# Altium footprint library SOP50P490X110-29N.PcbLib: 1 footprints
Each footprint in its own frame and in the unit in brackets; x right, y up, seen from the top. Pads: shape width x height; smd on the part's side, far side on the other; paste and mask are expansions set on the pad; w line width, h text height; cw(c..) or ccw(c..) is an arc to the next point about the centre after c.
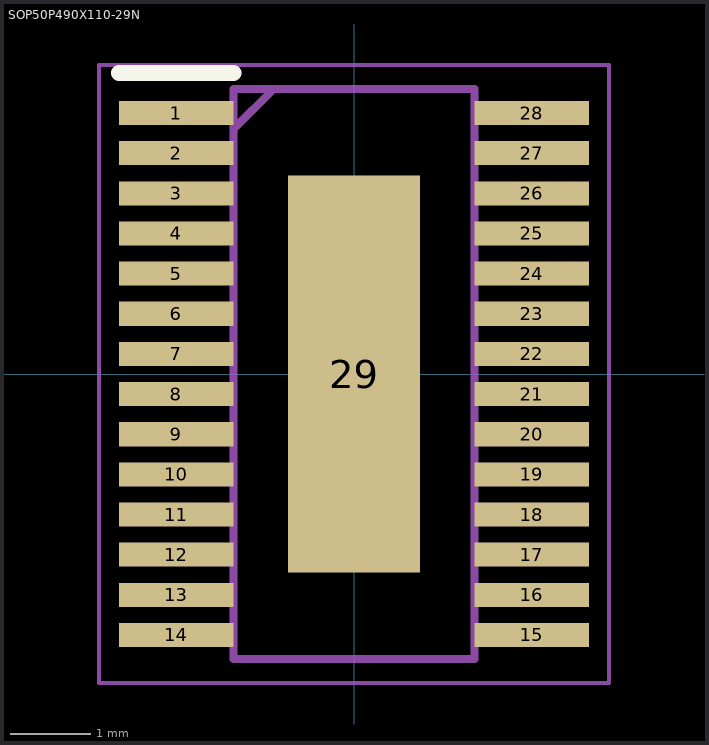
[diagram p0: the footprint, top view; thin cyan lines are the x and y axes]

## SOP50P490X110-29N [mm]
pads (29):
  rect 1.425x0.3 smd: 1(-2.212,3.25) 2(-2.212,2.75) 3(-2.212,2.25) 4(-2.212,1.75) 5(-2.212,1.25) 6(-2.212,0.75) 7(-2.212,0.25) 8(-2.212,-0.25) 9(-2.212,-0.75) 10(-2.212,-1.25) 11(-2.212,-1.75) 12(-2.212,-2.25) 13(-2.212,-2.75) 14(-2.212,-3.25) 15(2.212,-3.25) 16(2.212,-2.75) 17(2.212,-2.25) 18(2.212,-1.75) 19(2.212,-1.25) 20(2.212,-0.75) 21(2.212,-0.25) 22(2.212,0.25) 23(2.212,0.75) 24(2.212,1.25) 25(2.212,1.75) 26(2.212,2.25) 27(2.212,2.75) 28(2.212,3.25)
  rect 1.65x4.94 smd: 29(0,0)
Top Overlay:
  lines w0.2: -2.925,3.75 -1.5,3.75
Mechanical 15:
  lines w0.1: -1.5,3.05 -1,3.55 ; -1.5,-3.55 1.5,-3.55 1.5,3.55 -1.5,3.55 -1.5,-3.55
Mechanical 20:
  lines w0.05: -3.175,-3.85 3.175,-3.85 3.175,3.85 -3.175,3.85 -3.175,-3.85